# Altium footprint library ZooidPCB.PcbLib: 16 footprints
Each footprint in its own frame and in the unit in brackets; x right, y up, seen from the top. Pads: shape width x height; smd on the part's side, far side on the other; paste and mask are expansions set on the pad; w line width, h text height; cw(c..) or ccw(c..) is an arc to the next point about the centre after c.
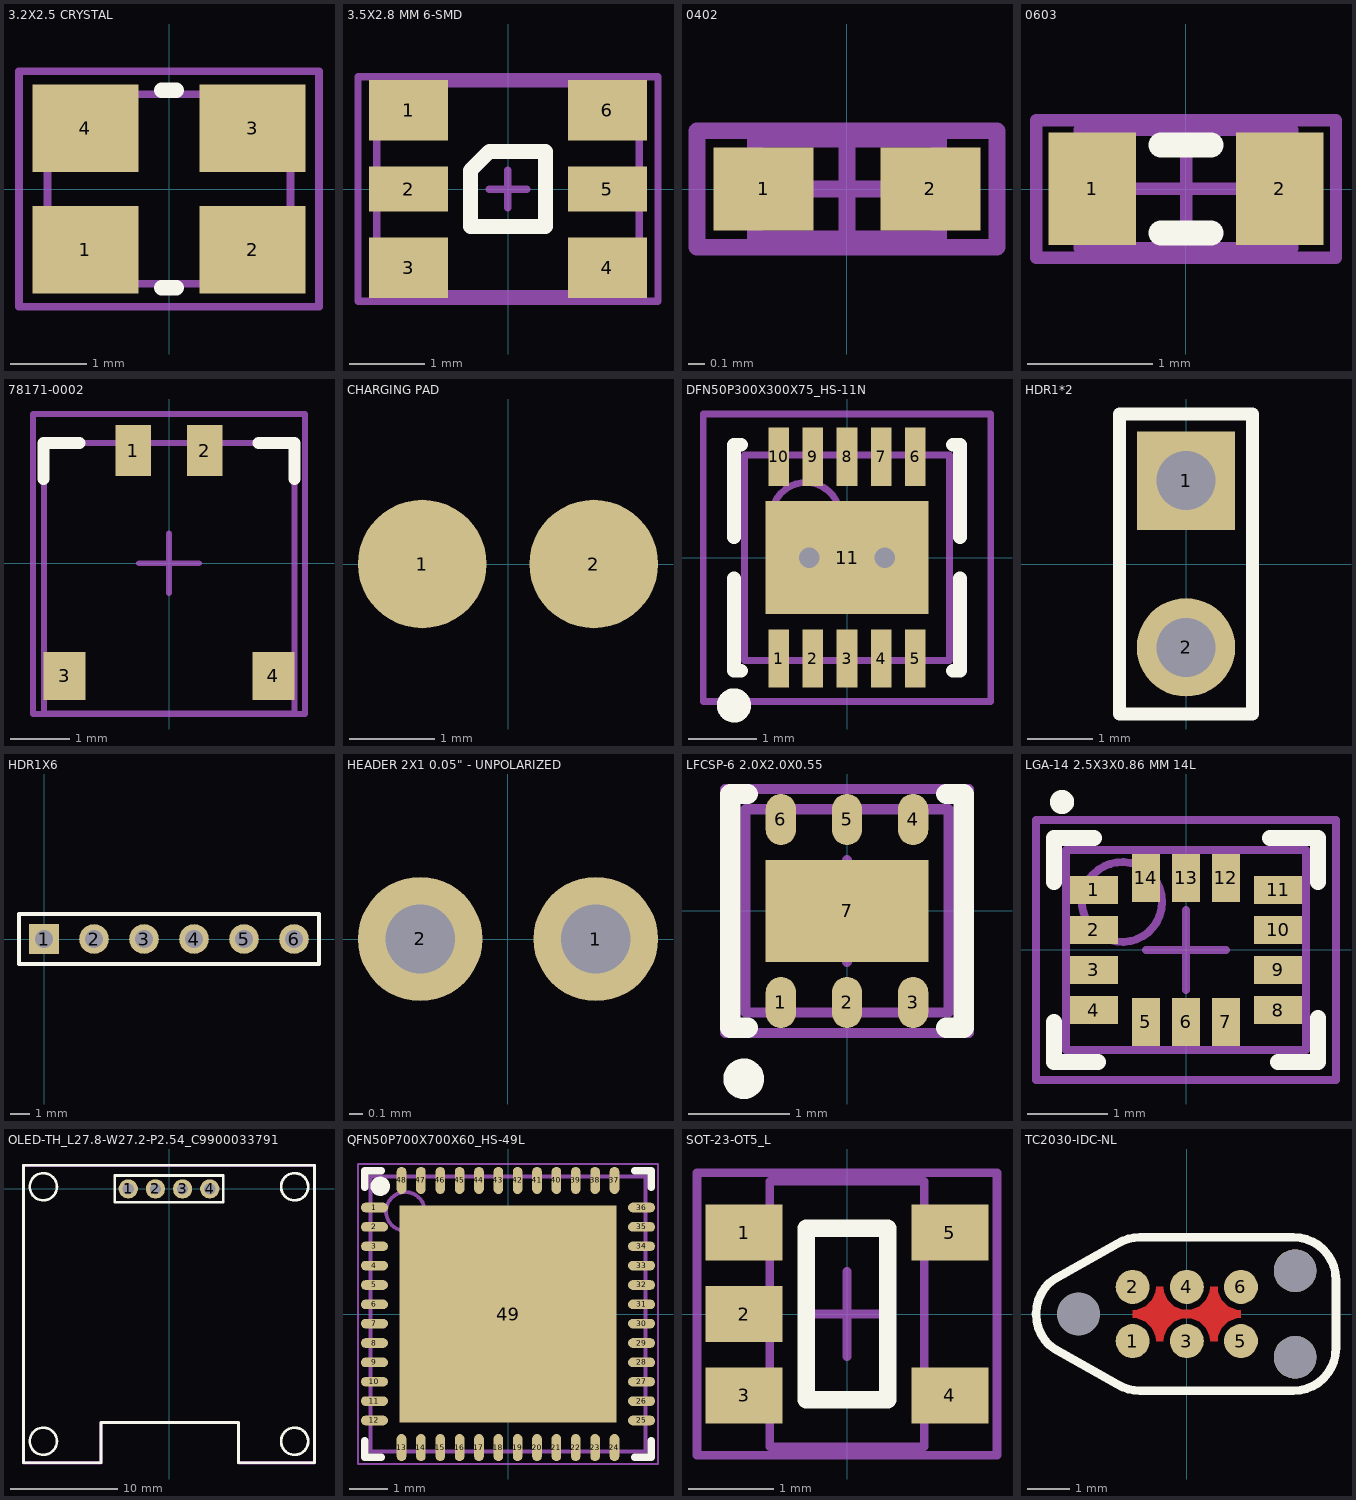
[diagram p0: the footprints below, top view; thin cyan lines are the x and y axes]

## 3.2X2.5 CRYSTAL [mm]
height 0.8
pads (4):
  rect 1.4x1.15 smd: 1(-1.1,-0.8) 2(1.1,-0.8) 3(1.1,0.8) 4(-1.1,0.8)
Top Overlay:
  lines w0.2: -0.1,-1.3 0.1,-1.3 ; -0.1,1.3 0.1,1.3
Mechanical 1:
  lines w0.1: -1.6,-1.25 -1.6,1.25 1.6,1.25 1.6,-1.25 -1.6,-1.25
Mechanical 15:
  lines w0.1: -1.975,-1.55 1.975,-1.55 1.975,1.55 -1.975,1.55 -1.975,-1.55
3D body: height 0.8, standoff 0, extent -1.6,-1.25 1.6,1.25

## 3.5X2.8 MM 6-SMD [mm] "3.5 x 2.8 mm 6-SMD Flat Leads"
height 0.6
pads (6):
  rect 1.05x0.8 smd: 1(-1.325,1.05) 3(-1.325,-1.05) 4(1.325,-1.05) 6(1.325,1.05)
  rect 1.05x0.6 smd: 2(-1.325,0) 5(1.325,0)
Top Overlay:
  lines w0.2: -0.5,-0.5 -0.5,0.25 -0.25,0.5 0.5,0.5 0.5,-0.5 -0.5,-0.5
Mechanical 13:
  lines w0.1: -1.75,-1.4 1.75,-1.4 1.75,1.4 -1.75,1.4 -1.75,-1.4
Mechanical 15:
  lines w0.1: -0.25,0 0.25,0 ; 0,-0.25 0,0.25 ; -2,-1.5 -2,1.5 2,1.5 2,-1.5 -2,-1.5
3D body "27979.stp": height 0.6, standoff 0, extent -1.75,-1.4 1.75,1.4

## 0402 [mm] "Chip Body 1.0 x 0.5 mm (LxW typ)"
height 0.55
pads (2):
  rect 0.6x0.5 smd: 1(-0.5,0) 2(0.5,0)
Mechanical 13:
  lines w0.1: -0.55,-0.3 0.55,-0.3 0.55,0.3 -0.55,0.3 -0.55,-0.3
Mechanical 15:
  lines w0.1: -0.3,0 0.3,0 ; 0,-0.3 0,0.3 ; -0.9,-0.35 0.9,-0.35 0.9,0.35 -0.9,0.35 -0.9,-0.35
3D body: height 0.55, standoff 0, extent -0.55,-0.3 0.55,0.3

## 0603 [mm] "Chip Body 1.6 x 0.8 mm (LxW typ)"
height 0.87
pads (2):
  rect 0.7x0.9 smd: 1(-0.75,0) 2(0.75,0)
Top Overlay:
  lines w0.2: -0.2,-0.35 0.2,-0.35 ; -0.2,0.35 0.2,0.35
Mechanical 13:
  lines w0.1: -0.85,-0.475 -0.85,0.475 0.85,0.475 0.85,-0.475 -0.85,-0.475
Mechanical 15:
  lines w0.1: -0.475,0 0.475,0 ; 0,-0.475 0,0.475 ; -1.2,-0.55 -1.2,0.55 1.2,0.55 1.2,-0.55 -1.2,-0.55
3D body: height 0.9, standoff 0, extent -0.85,-0.475 0.85,0.475

## 78171-0002 [mm]
height 1.55
pads (4):
  rect 0.6x0.85 smd: 1(-0.6,1.888) 2(0.6,1.888)
  rect 0.7x0.8 smd: 3(-1.75,-1.887) 4(1.75,-1.887)
Top Overlay:
  lines w0.2: -2.1,1.413 -2.1,2.013 -1.5,2.013 ; 1.5,2.013 2.1,2.013 2.1,1.413
Mechanical 1:
  lines w0.1: -2.095,-2.512 2.1,-2.512 2.1,2.013 -2.095,2.013 -2.095,-2.512
Mechanical 15:
  lines w0.1: -0.5,0 0.5,0 ; 0,-0.5 0,0.5 ; -2.275,-2.525 -2.275,2.5 2.275,2.5 2.275,-2.525 -2.275,-2.525
3D body "781710002.stp": height 1.45, standoff 0, extent -2.1,-2.512 2.1,2.018

## CHARGING PAD [mm]
pads (2):
  round 1.5 smd paste-5: 1(-1,0) 2(1,0)
3D body: height 0, standoff 0, extent -1.744,-0.749 -0.25,0.749
3D body: height 0, standoff 0, extent 0.252,-0.749 1.746,0.749

## DFN50P300X300X75_HS-11N [mm]
pads (11):
  rect 0.3x0.85 smd: 1(-1,-1.475) 2(-0.5,-1.475) 3(0,-1.475) 4(0.5,-1.475) 5(1,-1.475) 6(1,1.475) 7(0.5,1.475) 8(0,1.475) 9(-0.5,1.475) 10(-1,1.475)
  rect 2.38x1.65 smd: 11(0,0)
via 0.55,0 diameter 0.6 hole 0.3
via -0.55,0 diameter 0.6 hole 0.3
Top Overlay:
  circle w0.25: c-1.651,-2.159 r0.125
  lines w0.2: -1.65,-0.3 -1.65,-1.65 -1.55,-1.65 ; -1.65,0.3 -1.65,1.65 -1.55,1.65 ; 1.55,-1.65 1.65,-1.65 1.65,-0.3 ; 1.55,1.65 1.65,1.65 1.65,0.3
Mechanical 13:
  circle w0.1: c-0.6,0.6 r0.5
  lines w0.1: -1.5,-1.5 1.5,-1.5 1.5,1.5 -1.5,1.5 -1.5,-1.5
Mechanical 15:
  lines w0.1: -0.5,0 0.5,0 ; 0,-0.5 0,0.5 ; -2.1,-2.1 2.1,-2.1 2.1,2.1 -2.1,2.1 -2.1,-2.1
3D body: height 0.75, standoff 0, extent -1.5,-1.5 1.5,1.5

## HDR1*2 [mm]
pads (2):
  rect 1.5x1.5 hole 0.9: 1(0,1.27)
  round 1.5 hole 0.9: 2(0,-1.27)
Top Overlay:
  lines w0.2: -1.016,-2.286 -1.016,2.286 1.016,2.286 1.016,-2.286 -1.016,-2.286

## HDR1X6 [mm] "Connector; Header; 6 Position"
pads (6):
  rect 1.5x1.5 hole 0.9: 1(0,0)
  round 1.5 hole 0.9: 2(2.54,0) 3(5.08,0) 4(7.62,0) 5(10.16,0) 6(12.7,0)
Top Overlay:
  lines w0.2: -1.27,-1.27 -1.27,1.27 13.97,1.27 13.97,-1.27 -1.27,-1.27

## HEADER 2X1 0.05" - UNPOLARIZED [mm]
pads (2):
  round 0.9 hole 0.5: 1(0.635,0) 2(-0.635,0)
3D body: height 0.01, standoff 0, extent -1.25,-0.6 1.25,0.6

## LFCSP-6 2.0X2.0X0.55 [mm] ". 6-Lead Lead Frame Chip Scale Package [LFCSP_UD]  2.00 mm?2.00 mm Body, Ultra Thin, Dual Lead  (CP-6-3)"
height 0.55
pads (7):
  oval 0.3x0.5 smd: 1(-0.65,-0.9) 2(0,-0.9) 3(0.65,-0.9) 4(0.65,0.9) 5(0,0.9) 6(-0.65,0.9)
  rect 1.6x1 smd: 7(0,0)
Top Overlay:
  circle w0.2: c-1.016,-1.651 r0.1
  lines w0.2: -1.15,-1.15 -0.975,-1.15 ; -1.15,-1.125 -1.15,1.15 -0.975,1.15 ; 0.975,-1.15 1.15,-1.15 1.15,1.125 ; 0.975,1.15 1.15,1.15
Mechanical 13:
  lines w0.1: -1,-1 1,-1 1,1 -1,1 -1,-1
Mechanical 15:
  lines w0.1: -0.5,0 0.5,0 ; 0,-0.5 0,0.5 ; -1.2,-1.2 1.2,-1.2 1.2,1.2 -1.2,1.2 -1.2,-1.2
3D body: height 0.6, standoff 0.05, extent -1,-1 1,1

## LGA-14 2.5X3X0.86 MM 14L [mm] "LGA, 14-Leads, Body 3.00x2.50mm, Pitch 0.50mm, IPC High Density"
height 0.86
pads (14):
  rect 0.6x0.35 smd: 1(-1.15,0.75) 2(-1.15,0.25) 3(-1.15,-0.25) 4(-1.15,-0.75) 8(1.15,-0.75) 9(1.15,-0.25) 10(1.15,0.25) 11(1.15,0.75)
  rect 0.35x0.6 smd: 5(-0.5,-0.9) 6(0,-0.9) 7(0.5,-0.9) 12(0.5,0.9) 13(0,0.9) 14(-0.5,0.9)
Top Overlay:
  circle w0.2: c-1.55,1.85 r0.05
  lines w0.2: -1.65,-0.9 -1.65,-1.4 -1.1,-1.4 ; -1.65,0.85 -1.65,1.4 -1.15,1.4 ; 1.05,1.4 1.65,1.4 1.65,0.85 ; 1.15,-1.4 1.65,-1.4 1.65,-0.85
Mechanical 13:
  circle w0.1: c-0.8,0.6 r0.5
  lines w0.1: -1.5,-1.25 1.5,-1.25 1.5,1.25 -1.5,1.25 -1.5,-1.25
Mechanical 15:
  lines w0.1: -0.5,0 0.5,0 ; 0,-0.5 0,0.5 ; -1.875,-1.625 -1.875,1.625 1.875,1.625 1.875,-1.625 -1.875,-1.625
3D body: height 0.86, standoff 0.13, extent -1.5,-1.25 1.5,1.25

## OLED-TH_L27.8-W27.2-P2.54_C9900033791 [mm]
pads (4):
  round 1.8 hole 1.05 paste-2539.97 mask+0.05: 1(-3.81,0) 2(-1.27,0) 3(1.27,0) 4(3.81,0)
Top Overlay:
  circle w0.254: c-11.75,0.2 r1.27
  circle w0.254: c11.75,0.2 r1.27
  circle w0.254: c11.75,-23.6 r1.27
  circle w0.254: c-11.75,-23.6 r1.27
  lines w0.254: -13.599,-25.601 -6.35,-25.601 -6.35,-21.849 6.5,-21.849 6.5,-25.601 13.599,-25.601 13.599,2.2 -13.599,2.2 -13.599,-25.601 ; -5.08,-1.25 -5.08,1.25 5.08,1.25 5.08,-1.25 -5.08,-1.25
Mechanical 6:
  region: 6.5,-25.727 6.475,-25.727 6.428,-25.708 6.392,-25.672 6.373,-25.625 6.373,-25.6 6.373,-21.977 -6.223,-21.977 -6.223,-25.6 -6.223,-25.625 -6.242,-25.672 -6.278,-25.708 -6.325,-25.727 -6.35,-25.727 -13.6,-25.727 -13.625,-25.727 -13.672,-25.708 -13.708,-25.672 -13.727,-25.625 -13.727,-25.6 -13.727,2.2 -13.727,2.225 -13.708,2.272 -13.672,2.308 -13.625,2.327 -13.6,2.327 -13.575,2.327 -13.528,2.308 -13.492,2.272 -13.473,2.225 -13.473,2.2 -13.473,-25.473 -6.477,-25.473 -6.477,-21.85 -6.477,-21.825 -6.458,-21.778 -6.422,-21.742 -6.375,-21.723 -6.35,-21.723 6.5,-21.723 6.525,-21.723 6.572,-21.742 6.608,-21.778 6.627,-21.825 6.627,-21.85 6.627,-25.473 13.473,-25.473 13.473,2.2 13.473,2.225 13.492,2.272 13.528,2.308 13.575,2.327 13.6,2.327 13.625,2.327 13.672,2.308 13.708,2.272 13.727,2.225 13.727,2.2 13.727,-25.6 13.727,-25.625 13.708,-25.672 13.672,-25.708 13.625,-25.727 13.6,-25.727
  region: 13.6,2.073 -13.6,2.073 -13.653,2.073 -13.727,2.147 -13.727,2.253 -13.653,2.327 -13.6,2.327 13.6,2.327 13.653,2.327 13.727,2.253 13.727,2.147 13.653,2.073 13.6,2.073
Mechanical 15:
  region: -13.539,-25.601 -13.539,-25.576 -13.574,-25.541 -13.624,-25.541 -13.659,-25.576 -13.659,-25.601 -13.659,-25.626 -13.624,-25.661 -13.574,-25.661 -13.539,-25.626 -13.539,-25.601
  region: 3.49,0.32 4.13,0.32 4.13,-0.32 3.49,-0.32
  region: 0.95,0.32 1.59,0.32 1.59,-0.32 0.95,-0.32
  region: -1.59,0.32 -0.95,0.32 -0.95,-0.32 -1.59,-0.32
  region: -4.13,0.32 -3.49,0.32 -3.49,-0.32 -4.13,-0.32
  lines w0.051: -13.599,-25.601 -6.35,-25.601 -6.35,-21.849 6.5,-21.849 6.5,-25.601 13.599,-25.601 13.599,2.2 -13.599,2.2 -13.599,-25.601

## QFN50P700X700X60_HS-49L [mm] "QFN, 48-Leads, Body 7,00x7,00mm, Pitch 0,50mm, Thermal Pad 5,60x5,60mm, IPC High Density"
height 0.6
pads (49):
  oval 0.7x0.25 smd: 1(-3.45,2.75) 2(-3.45,2.25) 3(-3.45,1.75) 4(-3.45,1.25) 5(-3.45,0.75) 6(-3.45,0.25) 7(-3.45,-0.25) 8(-3.45,-0.75) 9(-3.45,-1.25) 10(-3.45,-1.75) 11(-3.45,-2.25) 12(-3.45,-2.75) 25(3.45,-2.75) 26(3.45,-2.25) 27(3.45,-1.75) 28(3.45,-1.25) 29(3.45,-0.75) 30(3.45,-0.25) 31(3.45,0.25) 32(3.45,0.75) 33(3.45,1.25) 34(3.45,1.75) 35(3.45,2.25) 36(3.45,2.75)
  oval 0.25x0.7 smd: 13(-2.75,-3.45) 14(-2.25,-3.45) 15(-1.75,-3.45) 16(-1.25,-3.45) 17(-0.75,-3.45) 18(-0.25,-3.45) 19(0.25,-3.45) 20(0.75,-3.45) 21(1.25,-3.45) 22(1.75,-3.45) 23(2.25,-3.45) 24(2.75,-3.45) 37(2.75,3.45) 38(2.25,3.45) 39(1.75,3.45) 40(1.25,3.45) 41(0.75,3.45) 42(0.25,3.45) 43(-0.25,3.45) 44(-0.75,3.45) 45(-1.25,3.45) 46(-1.75,3.45) 47(-2.25,3.45) 48(-2.75,3.45)
  rect 5.6x5.6 smd: 49(0,0)
Top Overlay:
  circle w0.25: c-3.3,3.3 r0.125
  lines w0.2: -3.7,-3.275 -3.7,-3.7 -3.275,-3.7 ; -3.7,3.275 -3.7,3.7 -3.275,3.7 ; 3.275,-3.7 3.7,-3.7 3.7,-3.275 ; 3.275,3.7 3.7,3.7 3.7,3.275
Mechanical 13:
  circle w0.1: c-2.65,2.65 r0.5
  lines w0.1: -3.55,-3.55 -3.55,3.55 3.55,3.55 3.55,-3.55 -3.55,-3.55
Mechanical 15:
  lines w0.05: -3.875,-3.875 -3.875,3.875 3.875,3.875 3.875,-3.875 -3.875,-3.875
  lines w0.1: -0.5,0 0.5,0 ; 0,-0.5 0,0.5
3D body: height 0.6, standoff 0.05, extent -3.55,-3.55 3.55,3.55

## SOT-23-OT5_L [mm] "SOT23, 5-Leads, Body 2.9x1.6mm, Pitch 0.95mm, Lead Span 2.7mm, IPC High Density"
height 1.45
pads (5):
  rect 0.9x0.65 smd: 1(-1.2,0.95) 2(-1.2,0) 3(-1.2,-0.95) 4(1.2,-0.95) 5(1.2,0.95)
Top Overlay:
  lines w0.2: -0.475,-1 -0.475,1 0.475,1 0.475,-1 -0.475,-1
Mechanical 13:
  lines w0.1: -0.9,-1.55 0.9,-1.55 0.9,1.55 -0.9,1.55 -0.9,-1.55
Mechanical 15:
  lines w0.1: -0.5,0 0.5,0 ; 0,-0.5 0,0.5 ; -1.75,-1.65 1.75,-1.65 1.75,1.65 -1.75,1.65 -1.75,-1.65
3D body: height 1.45, standoff 0, extent -0.9,-1.55 0.9,1.55

## TC2030-IDC-NL [mm] "TagConnector TC2030-IDC-NL"
pads (9):
  round 0.8 smd paste-1: 1(-1.27,-0.635) 2(-1.27,0.635) 3(0,-0.635) 4(0,0.635) 5(1.27,-0.635) 6(1.27,0.635)
  round 1 hole 1 unplated mask+0: ""(-2.54,0) ""(2.54,-1.016) ""(2.54,1.016)
Top Layer:
  pour cut-out: -1.27,-0.085 -1.27,0.085 -1.163,0.096 -0.964,0.178 -0.813,0.329 -0.731,0.528 -0.72,0.635 -0.55,0.635 -0.539,0.528 -0.457,0.329 -0.306,0.178 -0.107,0.096 0.107,0.096 0.306,0.178 0.457,0.329 0.539,0.528 0.55,0.635 0.72,0.635 0.731,0.528 0.813,0.329 0.964,0.178 1.163,0.096 1.27,0.085 1.27,-0.085 1.163,-0.096 0.964,-0.178 0.813,-0.329 0.731,-0.528 0.72,-0.635 0.55,-0.635 0.539,-0.528 0.457,-0.329 0.306,-0.178 0.107,-0.096 -0.107,-0.096 -0.306,-0.178 -0.457,-0.329 -0.539,-0.528 -0.55,-0.635 -0.72,-0.635 -0.731,-0.528 -0.813,-0.329 -0.964,-0.178 -1.163,-0.096
Top Overlay:
  lines w0.2: -3.111,-0.816 cw(c-2.544,0) -3.111,0.816 -1.63,1.648 cw(c-1.1,0.8) -1.1,1.8 2.5,1.8 cw(c2.5,0.8) 3.5,0.8 3.5,-0.8 cw(c2.5,-0.8) 2.5,-1.8 -1.1,-1.8 cw(c-1.1,-0.8) -1.63,-1.648 -3.111,-0.816
Mechanical 15:
  lines w0.1: -3.111,-0.816 cw(c-2.544,0) -3.111,0.816 -1.63,1.648 cw(c-1.1,0.8) -1.1,1.8 2.5,1.8 cw(c2.5,0.8) 3.5,0.8 3.5,-0.8 cw(c2.5,-0.8) 2.5,-1.8 -1.1,-1.8 cw(c-1.1,-0.8) -1.63,-1.648 -3.111,-0.816
3D body: height 0, standoff 0, extent -1.667,0.236 -0.87,1.034
3D body: height 0, standoff 0, extent -0.397,0.236 0.4,1.034
3D body: height 0, standoff 0, extent -0.4,-1.034 0.397,-0.236
3D body: height 0, standoff 0, extent -1.67,-1.034 -0.873,-0.236
3D body: height 0, standoff 0, extent 0.87,-1.034 1.667,-0.236
3D body: height 0, standoff 0, extent 0.873,0.236 1.67,1.034